# Altium integrated library loz-old-man.IntLib: 86 symbols (part 3 of 3)
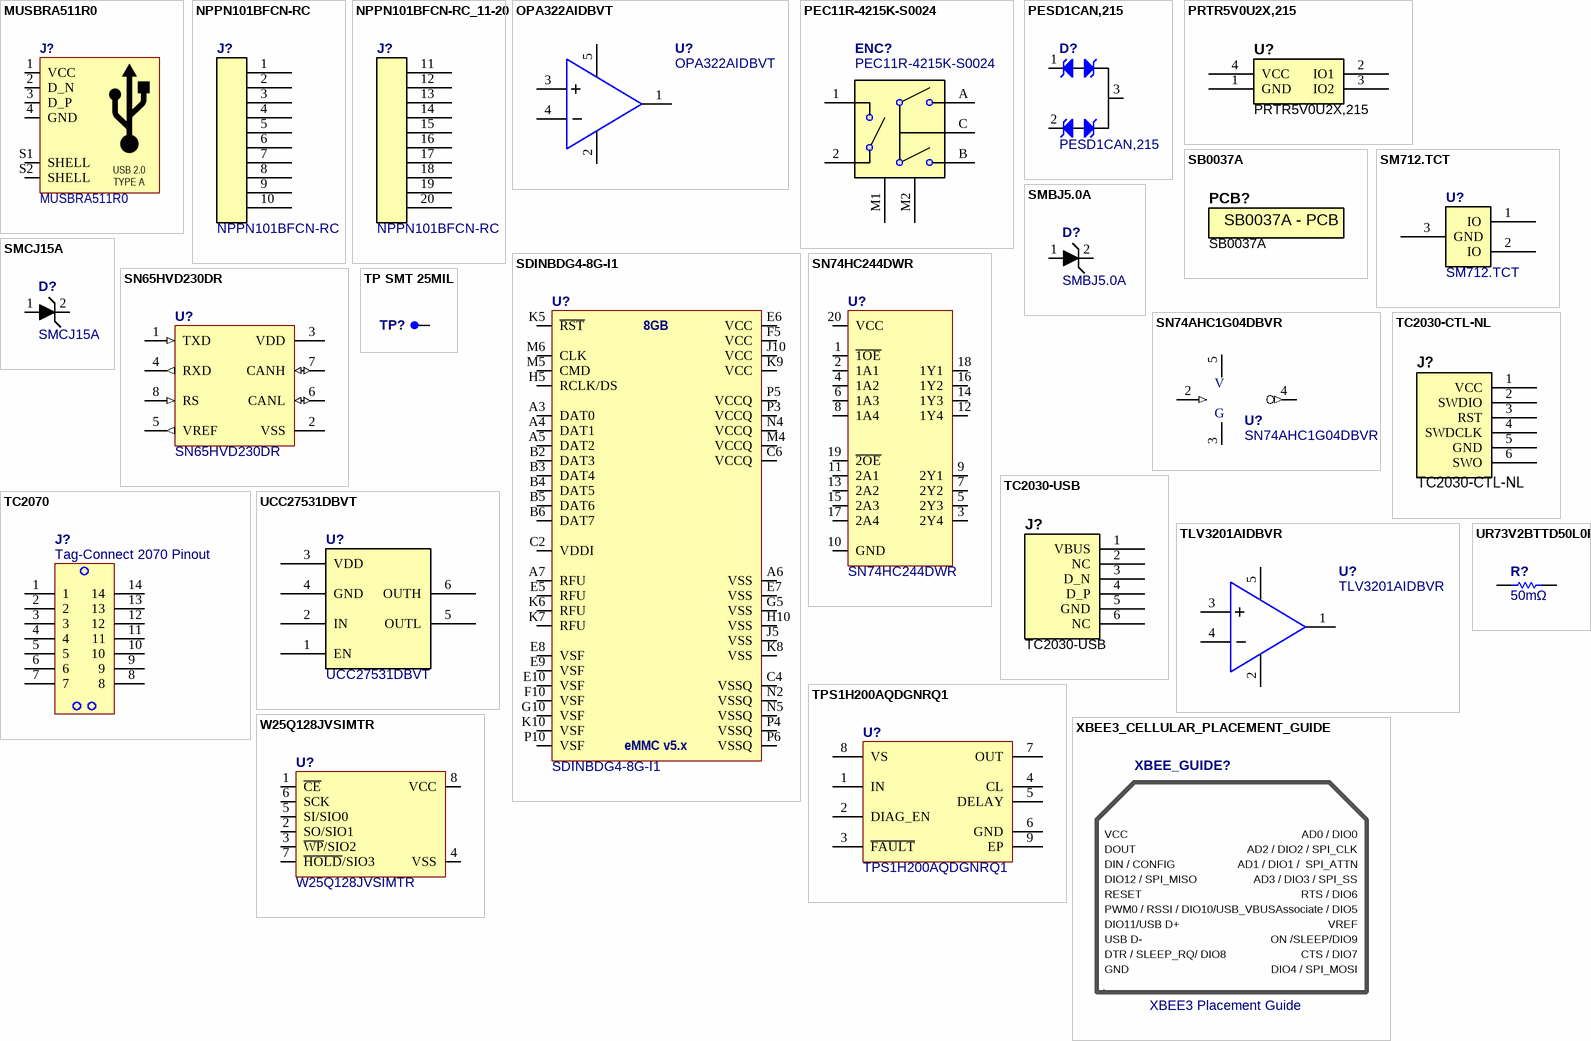
[diagram p7: symbols MUSBRA511R0 to XBEE3_CELLULAR_PLACEMENT_GUIDE]

## PEC11R-4215K-S0024
designator ENC?
Encoders 15mm SHAFT w/SWITCH; Manufacturer: Bourns; Number of Channels: 2; Pulses per Revolution: 24; Built in Switch: Yes; Encoder Type: Mechanical; Output Type: Quadrature,Incremental; Max Supply Voltage (DC): 5V; Hole Diameter: 1.8mm; Value: PEC11R-4215K-S0024; Supplier 1: Digi-Key; Supplier Part Number 1: PEC11R-4215K-S0024-ND; Manufacturer Part Number: PEC11R-4215K-S0024; RoHS: Yes; Category: Encoders; Stock: 2990; Pricing: 1=1.68000, 10=1.56600, 25=1.47920, 50=1.30500, 100=1.07300, 250=1.04400, 500=0.98600, 1000=0.92800, 5000=0.81200 (USD); Mount: Through Hole,Panel,PCB; Min Operating Temperature: -30°C; Max Operating Temperature: 70°C; Package Quantity: 150; Packaging: Bulk; Termination: PC Pin; Orientation: Vertical; Detent: Yes; Length: 21.5mm; Height: 13.4mm; Width: 12.5mm; REACH SVHC: No SVHC; ComponentLink1URL: https://datasheet.ciiva.com/29349/pec11r-29349515.pdf?src-supplier=Digi-Key; ComponentLink1Description: https://datasheet.ciiva.com/29349/pec11r-29349515.pdf?src-supplier=Digi-Key; ComponentLink2URL: https://datasheet.ciiva.com/30066/pec11r-221203-30066108.pdf?src-supplier=Onlinecomponents.com; ComponentLink2Description: https://datasheet.ciiva.com/30066/pec11r-221203-30066108.pdf?src-supplier=Onlinecomponents.com; ComponentLink3URL: https://datasheet.ciiva.com/12176/pec11r-221203-12176991.pdf?src-supplier=Mouser; ComponentLink3Description: https://datasheet.ciiva.com/12176/pec11r-221203-12176991.pdf?src-supplier=Mouser
footprint PEC11R-4215K-S0024 (Rotary mechanical Encoder)
pins: 1, 2, A, B, C, M1, M2

## PESD1CAN,215
designator D?
TVS DIODE 24VWM 70VC SOT23; Manufacturer: NXP Semiconductors; CategorySort: 400; Type: Zener; Bidirectional Channels: 2; Voltage - Reverse Standoff (Typ): 24V (Max); Voltage - Breakdown (Min): 25.4V; Voltage - Clamping (Max) @ Ipp: 70V; Current - Peak Pulse (10/1000µs): 3A (8/20µs); Power - Peak Pulse: 200W; Power Line Protection: No; Capacitance @ Frequency: 11pF @ 1MHz; Value: PESD1CAN,215; Sort Value: *; Category: Diodes; Supplier 1: Digi-Key; Supplier Part Number 1: 568-4032-1-ND; Manufacturer Part Number: PESD1CAN,215; RoHS: RoHS Compliant; Stock 1: 57937; Pricing 1: 1=0.55, 10=0.386, 25=0.3176, 100=0.2537, 250=0.1848, 500=0.15008, 1000=0.11536 (USD); Packaging: Cut Tape (CT); Unidirectional Channels: -; Applications: Automotive; Operating Temperature: -65°C ~ 150°C; Mounting Type: Surface Mount; Package: TO-236-3, SC-59, SOT-23-3; Supplier Device Package: SOT-23-3; ComponentLink1URL: http://www.nxp.com/documents/data_sheet/PESD1CAN.pdf; ComponentLink1Description: http://www.nxp.com/documents/data_sheet/PESD1CAN.pdf; Manufacturer 1: NXP Semiconductors; Manufacturer Part Number 1: PESD1CAN,215
footprint SOT23_MEDIUM (SOT23, 3-Leads, Body 2.90x2.30mm, Pitch 0.95mm, IPC Medium Density)
pins: 1 C1, 2 C2, 3 A

## PRTR5V0U2X,215
designator U?
TVS DIODE 5.5VWM SOT143B; Manufacturer: NXP Semiconductors; Bidirectional Channels: 2; Voltage - Reverse Standoff (Typ): 5.5V (Max); Voltage - Breakdown (Min): 6V; Power Line Protection: Yes; Capacitance @ Frequency: 1pF @ 1MHz; Supplier 1: Digi-Key; Supplier Part Number 1: 568-4140-1-ND; Manufacturer Part Number: PRTR5V0U2X,215; RoHS: RoHS Compliant; Category: Circuit Protection; Stock: 11734; Pricing: 1=0.57, 10=0.477, 25=0.418, 100=0.3578, 250=0.31036, 500=0.26286, 1000=0.20265 (USD); Packaging: Cut Tape (CT); Type: Steering (Rail to Rail); Unidirectional Channels: -; Voltage - Clamping (Max) @ Ipp: -; Current - Peak Pulse (10/1000µs): -; Power - Peak Pulse: -; Applications: General Purpose; Operating Temperature: -40°C ~ 85°C (TA); Mounting Type: Surface Mount; Package / Case: TO-253-4, TO-253AA; Supplier Device Package: SOT-143B; ComponentLink1URL: http://www.nxp.com/documents/data_sheet/PRTR5V0U2X.pdf; ComponentLink1Description: http://www.nxp.com/documents/data_sheet/PRTR5V0U2X.pdf; Value: PRTR5V0U2X,215
footprint SOT143B
pins: 1 GND, 2 IO1, 3 IO2, 4 VCC
1 alternate drawing of the same symbol

## SB0037A
designator PCB?  (mechanical)
SB0037 Temp Controller Raw PCB Rev A; Manufacturer: TZero; Manufacturer Part Number: SB0024B; Value: SB0037A
text: SB0037A - PCB

## SDINBDG4-8G-I1
designator U?
eMMC eMMC seq 300/40 IOPs 7800/8000; Manufacturer: SanDisk; CategorySort: 600; Memory Size: 8 GB; Product Status: New Product; Category: Integrated Circuits; Value: SDINBDG4-8G-I1; Supplier 1: Mouser; Supplier Part Number 1: 467-SDINBDG4-8G-I1; Manufacturer Part Number: SDINBDG4-8G-I1; RoHS: RoHS Compliant; Stock 1: 2925; Pricing 1: 1=9.57, 5=9.03, 10=8.76, 25=8.65, 50=8.61, 100=8.33, 250=8.12, 500=7.95, 1000=7.86 (USD); Series: iNAND 7250; Brand: SanDisk; Moisture Sensitive: Yes; Product Type: eMMC; Standard Pack Qty: 152; Subcategory: Memory & Data Storage; Tradename: iNAND; RoHS - Mouser: Y; Minimum Order Quantity: 1; Reeling: False; ComponentLink1URL: http://www.mouser.com/datasheet/2/669/sandisk_09132017_SanDisk_COM-AUTO-INDUST_DISTI_LIN-1145140.pdf; ComponentLink1Description: http://www.mouser.com/datasheet/2/669/sandisk_09132017_SanDisk_COM-AUTO-INDUST_DISTI_LIN-1145140.pdf
footprint BGA_JDEC_EMMC_11.5x13.1x1.1_153PIN (eMMC JDEC 11.5 x 13.1 x 1.1 MM - 153-PIN)
pins: A3 DAT0, A4 DAT1, A5 DAT2, A6 VSS, A7 RFU, B2 DAT3, B3 DAT4, B4 DAT5, B5 DAT6, B6 DAT7, C2 VDDI, C4 VSSQ, C6 VCCQ, E5 RFU, E6 VCC, E7 VSS, E8 VSF, E9 VSF, E10 VSF, F5 VCC, F10 VSF, G5 VSS, G10 VSF, H5 RCLK/DS, H10 VSS, J5 VSS, J10 VCC, K5 ~{RST}, K6 RFU, K7 RFU, K8 VSS, K9 VCC, K10 VSF, M4 VCCQ, M5 CMD, M6 CLK, N2 VSSQ, N4 VCCQ, N5 VSSQ, P3 VCCQ, P4 VSSQ, P5 VCCQ, P6 VSSQ, P10 VSF
text: 8GB; eMMC v5.x

## SM712.TCT
designator U?
TVS DIODE 12VWM/7VWM SOT23; Manufacturer: Semtech; Direction: Bidirectional; Number of Elements: 2; Reverse Breakdown Voltage: 13.3V; Reverse Standoff Voltage: 12V; Min Breakdown Voltage: 7.5V; Clamping Voltage: 26V; Peak Pulse Power: 400W; Power Line Protection: No; Leakage Current: 1uA; Peak Pulse Current: 17A; Test Current: 1mA; ESD Protection: Yes; Max Reverse Leakage Current: 20uA; Element Configuration: Dual; ComponentLink1URL: https://datasheet.ciiva.com/16393/sm712-16393584.pdf; ComponentLink1Description: https://datasheet.ciiva.com/16393/sm712-16393584.pdf; ComponentLink2URL: https://datasheet.ciiva.com/339/sm712-339089.pdf; ComponentLink2Description: https://datasheet.ciiva.com/339/sm712-339089.pdf; ComponentLink3URL: https://datasheet.ciiva.com/339/sm712-339090.pdf; ComponentLink3Description: https://datasheet.ciiva.com/339/sm712-339090.pdf; ComponentLink4URL: https://datasheet.ciiva.com/339/sm712-339091.pdf; ComponentLink4Description: https://datasheet.ciiva.com/339/sm712-339091.pdf; ComponentLink5URL: https://datasheet.ciiva.com/18065/getdatasheetpartid-110620-18065348.pdf; ComponentLink5Description: https://datasheet.ciiva.com/18065/getdatasheetpartid-110620-18065348.pdf; ComponentLink6URL: https://datasheet.ciiva.com/25958/sm712-25958326.pdf; ComponentLink6Description: https://datasheet.ciiva.com/25958/sm712-25958326.pdf; ComponentLink7URL: https://datasheet.ciiva.com/5748/579001-5748455.pdf; ComponentLink7Description: https://datasheet.ciiva.com/5748/579001-5748455.pdf; ComponentLink8URL: https://datasheet.ciiva.com/8029/579001-8029931.pdf; ComponentLink8Description: https://datasheet.ciiva.com/8029/579001-8029931.pdf; Supplier 1: Digi-Key; Supplier Part Number 1: SM712CT-ND; Manufacturer Part Number: SM712.TCT; Stock 1: 46130; Pricing 1: 1=1.79, 10=1.615, 25=1.442, 100=1.2978, 250=1.1536, 500=1.0094, 1000=0.8364 (USD); Mount: Surface Mount; Case/Package: SOT-23; Number of Pins: 3; Min Operating Temperature: -55°C; Max Operating Temperature: 125°C; Packaging: Tape and Reel; Number of Bidirectional Channels: 2; Power Dissipation: 400W; Polarity: Bidirectional; Working Voltage: 12V; Max Breakdown Voltage: 13.3V; Max Power Dissipation: 400W; Voltage Rating (DC): 12V; Breakdown Voltage: 13.3V; Length: 2.9mm; Height: 0.95mm; Width: 1.3mm; Depth: 1.3mm; Radiation Hardening: No; REACH SVHC: No SVHC; Lead Free: Lead Free; Value: SM712.TCT
footprint SOT-23
pins: 1 IO, 2 IO, 3 GND

## SMBJ5.0A
designator D?
TVS 5.0 VOLT 600 WATT UNI-DIR SM; Manufacturer: Littelfuse Inc; CategorySort: 850; Voltage - Reverse Standoff (Typ): 5V; Voltage - Breakdown: 6.4V; Power (Watts): 600W; Polarization: Unidirectional; Diode Suffix: 1A_2C; Value: SMBJ5.0A; Category: Circuit Protection; Supplier 1: Digi-Key; Supplier Part Number 1: SMBJ5.0ALFCT-ND; Manufacturer Part Number: SMBJ5.0A; Package: DO-214AA- SMB; Packaging: Cut Tape (CT); ComponentLink1URL: http://www.littelfuse.com/~/media/Files/Littelfuse/Technical%20Resources/Documents/Data%20Sheets/Littelfuse_TVS%20Diode_SMBJ.pdf; ComponentLink1Description: Internal Datasheet; ComponentLink2Description: External Datasheet; ComponentLink2URL: http://www.littelfuse.com/~/media/Files/Littelfuse/Technical%20Resources/Documents/Data%20Sheets/Littelfuse_TVS%20Diode_SMBJ.pdf; Stocked: -; SortValue: SMBJ5.0A; Pricing: 1 = 0.46  ;  10 = 0.384  ;  25 = 0.336  ;  100 = 0.2877  ;  250 = 0.24952  ;  500 = 0.21134  ;  1000 = 0.16293 (USD); Sales Status: Active; Mounting Type: Surface Mount; Supplier Device Package: SMB
footprint D_SMB_P
footprint -
pins: 1 A, 2 K

## SMCJ15A
designator D?
DIODE TVS 15V 1500W UNI 5% SMC; Manufacturer: Littelfuse Inc; CategorySort: 850; Voltage - Breakdown: 16.7V; Polarization: Unidirectional; Diode Suffix: 1A_2C; Category: Circuit Protection; Value: SMCJ15A; Manufacturer Part Number: SMCJ15A; ComponentLink1Description: Internal Datasheet; ComponentLink1URL: http://www.littelfuse.com/data/en/Data_Sheets/Littelfuse_TVS_Diode_SMCJ.pdf; ComponentLink2Description: External Datasheet; ComponentLink2URL: http://www.littelfuse.com/data/en/Data_Sheets/Littelfuse_TVS_Diode_SMCJ.pdf; Supplier 1: Digi-Key; Supplier Part Number 1: SMCJ15ALFCT-ND; SortValue: SMCJ15A; Voltage - Reverse Standoff (Typ): 15V; Power (Watts): 1500W; Mounting Type: Surface Mount; Package: DO-214AB- SMC; Supplier Device Package: SMC; Packaging: Cut Tape (CT)
footprint D_SMC_P
footprint -
pins: 1 A, 2 K

## SN65HVD230DR
designator U?
CAN Interface IC STANDBY MODE; Manufacturer: Texas Instruments; CategorySort: 600; Data Rate: 1 Mbps; Operating Supply Voltage: 3.3 V; Supply Voltage - Max: 3.6 V; Supply Voltage - Min: 3 V; Value: SN65HVD230DR; Sort Value: *; Category: Integrated Circuits; Supplier 1: Mouser; Supplier Part Number 1: 595-SN65HVD230DR; Manufacturer Part Number: SN65HVD230DR; RoHS: RoHS Compliant; Stock 1: 6781; Pricing 1: 1=1.95, 10=1.62, 25=1.44, 100=0.972, 250=0.954, 500=0.935, 750=0.917, 2500=0.900 (USD); Package: SOIC-8; Packaging: Reel; Series: SN65HVD230; Type: Transceiver; Mounting Style: SMD/SMT; Maximum Operating Temperature: + 85 C; Minimum Operating Temperature: - 40 C; Product Category: Display Interface; Standard Pack Qty: 2500; RoHS - Mouser: Y; Minimum Order Quantity: 1; Reeling: True; ComponentLink1URL: http://www.ti.com/litv/slos346k; ComponentLink1Description: http://www.ti.com/litv/slos346k
footprint SOIC-8 (SOIC, 8-Leads, Body 5.0x4.0mm (max), Pitch 1.27mm, IPC Medium Density)
pins: 1 TXD (in), 2 VSS (power), 3 VDD (power), 4 RXD (out), 5 VREF (out), 6 CANL (io), 7 CANH (io), 8 RS (in)

## SN74AHC1G04DBVR
designator U?
IC SINGLE INVERTER GATE SOT23-5; Manufacturer: Texas Instruments; CategorySort: 600; Number of Inputs: 1; Current - Output High, Low: 8mA, 8mA; Voltage - Supply: 2 V ~ 5.5 V; Value: SN74AHC1G04DBVR; Sort Value: *; Category: Integrated Circuits; Supplier 1: Digi-Key; Supplier Part Number 1: 296-1089-1-ND; Manufacturer Part Number: SN74AHC1G04DBVR; RoHS: RoHS Compliant; Stock 1: 45111; Pricing 1: 1=0.53, 25=0.31, 100=0.25, 250=0.18, 500=0.145, 1000=0.1125 (USD); Logic Type: Inverter; Number of Circuits: 1; Operating Temperature: -40°C ~ 85°C; Mounting Type: Surface Mount; Package: SC-74A, SOT-753; Supplier Device Package: SOT-23-5; Packaging: Cut Tape (CT); ComponentLink1URL: http://focus.ti.com/lit/ds/symlink/sn74ahc1g04.pdf; ComponentLink1Description: http://focus.ti.com/lit/ds/symlink/sn74ahc1g04.pdf
footprint TSOT-23-5 (SOT23, 5-Leads, Body 3.0x2.9mm (max), Pitch 0.95mm, IPC Medium Density)
pins: 2 A (in), 3 GND, 4 Y (out), 5 VCC
text: V; G

## SN74HC244DWR
designator U?
IC BUFF/DVR TRI-ST DUAL 20SOIC; Manufacturer: Texas Instruments; CategorySort: 600; Logic Type: Buffer/Line Driver, Non-Inverting; Number of Elements: 2; Number of Bits per Element: 4; Current - Output High, Low: 7.8mA, 7.8mA; Voltage - Supply: 2 V ~ 6 V; Value: SN74HC244DWR; Sort Value: *; Category: Integrated Circuits; Supplier 1: Digi-Key; Manufacturer Part Number: SN74HC244DWR; RoHS: RoHS Compliant; Stock 1: 40951; Pricing 1: 1=0.58, 25=0.4044, 100=0.3465, 250=0.29924, 500=0.25726, 1000=0.1995 (USD); Operating Temperature: -40°C ~ 85°C; Mounting Type: Surface Mount; Package: 20-SOIC (0.300", 7.50mm Width); Packaging: Cut Tape (CT); Supplier Device Package: 20-SOIC; ComponentLink1URL: http://focus.ti.com/lit/ds/symlink/sn74hc244.pdf; ComponentLink1Description: http://focus.ti.com/lit/ds/symlink/sn74hc244.pdf; Supplier Part Number 1: 296-1196-1-ND
footprint SOIC-20-300_MEDIUM (SOIC-20 0.300 inch wide)
pins: 1 ~{1OE}, 2 1A1, 3 2Y4, 4 1A2, 5 2Y3, 6 1A3, 7 2Y2, 8 1A4, 9 2Y1, 10 GND, 11 2A1, 12 1Y4, 13 2A2, 14 1Y3, 15 2A3, 16 1Y2, 17 2A4, 18 1Y1, 19 ~{2OE}, 20 VCC

## TC2030‐CTL‐NL
designator J?  (no BOM)
Tag Connect Pads - No latching Clips - ARM; Value: TC2030‐CTL‐NL
footprint TC2030 NO LATCH (TC2030  NO LATCH)
footprint TC2030 DOUBLE SIDED NO LATCH (TC2030 Double Sided No Latch)
footprint TC2030 DOUBLE SIDED (TC2030 Double Sided)
footprint TC2030 (TC2030-MCP)
pins: 1 VCC, 2 SWDIO, 3 RST, 4 SWDCLK, 5 GND, 6 SWO

## TC2030‐USB
designator J?  (no BOM)
Tag Connect Pads - No latching Clips - USB; Value: TC2030‐USB
footprint TC2030 NO LATCH (TC2030  NO LATCH)
footprint TC2030 DOUBLE SIDED NO LATCH (TC2030 Double Sided No Latch)
footprint TC2030 DOUBLE SIDED (TC2030 Double Sided)
footprint TC2030 (TC2030-MCP)
pins: 1 VBUS, 2 NC, 3 D_N, 4 D_P, 5 GND, 6 NC

## TC2070
designator J?, comment Tag-Connect 2070 Pinout  (no BOM)
footprint TC2070 (TC2070 14-PIN TAG-CONNECT WITH LEGS)
footprint TC2070-NL (TC2070 14-PIN TAG-CONNECT WITH LEGS)
pins: 1, 2, 3, 4, 5, 6, 7, 8, 9, 10, 11, 12, 13, 14

## TLV3201AIDBVR
designator U?
Single high speed, low power comparator 5-SOT-23 -40 to 125; Manufacturer: Texas Instruments; Max Supply Voltage: 5.5V; Min Supply Voltage: 2.7V; Number of Channels: 1; Nominal Supply Current: 50uA; Common Mode Rejection Ratio: 70dB; Propagation Delay: 50ns; Max Supply Current: 40uA; Input Bias Current: 5nA; Input Offset Voltage (Vos): 5mV; Response Time: 0.047us; Hysteresis: 1.2mV; Power Supply Rejection Ratio (PSRR): 85dB; Output Current: 21mA; Value: TLV3201AIDBVR; Supplier 1: Digi-Key; Supplier Part Number 1: 296-36750-1-ND; Manufacturer Part Number: TLV3201AIDBVR; Category: Comparators; Stock: 27179; Pricing: 1=1.36000, 10=1.21500, 25=1.15360, 100=0.88580, 250=0.78280, 500=0.74160, 1000=0.57680 (USD); Mount: Surface Mount; Case/Package: SOT-23-5; Number of Pins: 5; Contact Plating: Gold; Min Operating Temperature: -40°C; Max Operating Temperature: 125°C; Packaging: Tape and Reel; Package Quantity: 3000; Number of Elements: 1; Max Input Current: 5nA; Quiescent Current: 40uA; Type: General Purpose; Radiation Hardening: No; Lead Free: Lead Free; REACH SVHC: No SVHC; ComponentLink1URL: https://datasheet.ciiva.com/12286/sbos561a-203450-12286704.pdf?src-supplier=Mouser; ComponentLink1Description: https://datasheet.ciiva.com/12286/sbos561a-203450-12286704.pdf?src-supplier=Mouser; ComponentLink2URL: https://datasheet.ciiva.com/29634/tlv3201-29634998.pdf?src-supplier=Digi-Key; ComponentLink2Description: https://datasheet.ciiva.com/29634/tlv3201-29634998.pdf?src-supplier=Digi-Key; ComponentLink3URL: https://datasheet.ciiva.com/29634/tlv3201-29634999.pdf?src-supplier=Digi-Key; ComponentLink3Description: https://datasheet.ciiva.com/29634/tlv3201-29634999.pdf?src-supplier=Digi-Key; ComponentLink4URL: https://datasheet.ciiva.com/29635/tlv3201-29635000.pdf?src-supplier=Digi-Key; ComponentLink4Description: https://datasheet.ciiva.com/29635/tlv3201-29635000.pdf?src-supplier=Digi-Key; ComponentLink5URL: https://datasheet.ciiva.com/2966/tlv3202-2966810.pdf?src-supplier=Avnet; ComponentLink5Description: https://datasheet.ciiva.com/2966/tlv3202-2966810.pdf?src-supplier=Avnet; ComponentLink6URL: https://octopart.com/click/track?ai=8629&ct=datasheets&sig=0da13b1&at=physicalpart&sid=370&ppid=22616100&hlid=24934711&src-supplier=TI+store; ComponentLink6Description: https://octopart.com/click/track?ai=8629&ct=datasheets&sig=0da13b1&at=physicalpart&sid=370&ppid=22616100&hlid=24934711&src-supplier=TI+store; ComponentLink7URL: http://datasheet.octopart.com/TLV3201AIDBVR-Texas-Instruments-datasheet-37140356.pdf?src-supplier=Newark; ComponentLink7Description: http://datasheet.octopart.com/TLV3201AIDBVR-Texas-Instruments-datasheet-37140356.pdf?src-supplier=Newark; ComponentLink8URL: http://datasheet.octopart.com/TLV3201AIDBVR-Texas-Instruments-datasheet-10947357.pdf?src-supplier=TI+store; ComponentLink8Description: http://datasheet.octopart.com/TLV3201AIDBVR-Texas-Instruments-datasheet-10947357.pdf?src-supplier=TI+store; ComponentLink9URL: http://datasheet.octopart.com/TLV3201AIDBVR-Texas-Instruments-datasheet-11515870.pdf?src-supplier=TI+store; ComponentLink9Description: http://datasheet.octopart.com/TLV3201AIDBVR-Texas-Instruments-datasheet-11515870.pdf?src-supplier=TI+store; ComponentLink10URL: http://sigma.octopart.com/49249325/technical_drawing/Texas-Instruments-TLV3201AIDBVR.pdf?src-supplier=TI+store; ComponentLink10Description: http://sigma.octopart.com/49249325/technical_drawing/Texas-Instruments-TLV3201AIDBVR.pdf?src-supplier=TI+store; ComponentLink11URL: http://sigma.octopart.com/102331370/technical_drawing/Texas-Instruments-TLV3201AIDBVR.pdf?src-supplier=TI+store; ComponentLink11Description: http://sigma.octopart.com/102331370/technical_drawing/Texas-Instruments-TLV3201AIDBVR.pdf?src-supplier=TI+store; ComponentLink12URL: http://datasheet.octopart.com/TLV3201AIDBVR-Texas-Instruments-datasheet-103689170.pdf?src-supplier=Newark; ComponentLink12Description: http://datasheet.octopart.com/TLV3201AIDBVR-Texas-Instruments-datasheet-103689170.pdf?src-supplier=Newark; ComponentLink13URL: http://datasheet.octopart.com/TLV3201AIDBVR-Texas-Instruments-datasheet-81455961.pdf?src-supplier=TME; ComponentLink13Description: http://datasheet.octopart.com/TLV3201AIDBVR-Texas-Instruments-datasheet-81455961.pdf?src-supplier=TME
footprint SOT23-5 (SOT23, 5-Leads, Body 3.1x2.6mm (max), Pitch 0.95mm, IPC High Density)
pins: 1 OUT, 2 GND, 3 +, 4 -, 5 VCC

## TP SMT 25MIL
designator TP?  (net tie, no BOM)
Sort Value: *; Category: *; CategorySort: *
footprint TP_SMT_25_MIL_ROUND
pins: 1

## TPS1H200AQDGNRQ1
designator U?
SINGLE CHANNEL HIGH SIDE POWER S; Manufacturer: Texas Instruments; Number of Channels: 1; CategorySort: 600; Supplier 1: Digi-Key; Manufacturer Part Number: TPS1H200AQDGNRQ1; Stock 1: 8489; Pricing 1: 1 = 1.59000, 10 = 1.43000, 100 = 1.14960, 500 = 0.94452, 1000 = 0.78259 (USD); RoHS: No; Min Operating Temperature: -40°C; Max Operating Temperature: 125°C; ComponentLink1URL: http://www.ti.com/lit/ds/symlink/tps1h200a-q1.pdf?src-supplier=Digi-Key; ComponentLink1Description: http://www.ti.com/lit/ds/symlink/tps1h200a-q1.pdf?src-supplier=Digi-Key; Supplier Part Number 1: 296-50416-1-ND; Category: Integrated Circuits; Value: TPS1H200AQDGNRQ1
footprint TI_DGN_MD (HVSSOP, 8-Leads, Body 3.00x3.00mm, Pitch 0.65mm, Thermal Pad 1.89x1.57mm, IPC Medium Density)
footprint TI_DGN_HD (HVSSOP, 8-Leads, Body 3.00x3.00mm, Pitch 0.65mm, Thermal Pad 1.89x1.57mm, IPC High Density)
pins: 1 IN, 2 DIAG_EN, 3 ~{FAULT}, 4 CL, 5 DELAY, 6 GND, 7 OUT, 8 VS, 9 EP

## UCC27531DBVT
designator U?
IC GATE DRVR IGBT/MOSFET SOT23-6; Manufacturer: Texas Instruments; Driven Configuration: High-Side or Low-Side; Channel Type: Single; Gate Type: IGBT, N-Channel MOSFET; Voltage - Supply: 10 V ~ 32 V; Logic Voltage - VIL, VIH: 1.2V, 2.2V; Current - Peak Output (Source, Sink): 2.5A, 5A; Input Type: Non-Inverting; Rise / Fall Time (Typ): 15ns, 7ns; Value: UCC27531DBVT; Supplier 1: Digi-Key; Supplier Part Number 1: 296-35613-1-ND; Manufacturer Part Number: UCC27531DBVT; RoHS: RoHS Compliant; Category: Integrated Circuits (ICs); Stock 1: 1544; Pricing 1: 1=2.36, 10=2.121, 100=1.7047 (USD); Packaging: Cut Tape (CT); Part Status: Active; Operating Temperature: -40°C ~ 140°C (TJ); Mounting Type: Surface Mount; Package / Case: SOT-23-6; Supplier Device Package: SOT-23-6; ComponentLink1URL: http://www.ti.com/lit/ds/symlink/ucc27531.pdf; ComponentLink1Description: http://www.ti.com/lit/ds/symlink/ucc27531.pdf
footprint SOT95P245X145-6L (SOT23, 5-Leads, Body 3.1x2.6mm (max), Pitch 0.95mm, IPC High Density)
pins: 1 EN, 2 IN, 3 VDD, 4 GND, 5 OUTL, 6 OUTH

## UR73V2BTTD50L0F
designator R?, comment 50mΩ
RES 0.05 OHM 1% 1/2W 1206; Manufacturer: KOA Speer Electronics, Inc.; Manufacturer Part Number: UR73V2BTTD50L0F; Package Power: PACKAGE (POWER); Temperature Coefficient: ±75ppm/°C; Power (Watts): 0.5W, 1/2W; Substitution Notes: 50mΩ , 1206 , ±1% , ±75ppm/°C ,  0.5W, 1/2W , AEC-Q200; Value: 50mΩ; ComponentLink1Description: Datasheet (Internal); ComponentLink1URL: http://www.koaspeer.com/catimages/Products/UR73V/UR73V.pdf; ComponentLink2Description: Datasheet (External); ComponentLink2URL: http://www.koaspeer.com/catimages/Products/UR73V/UR73V.pdf; Supplier 1: Digikey; Supplier Part Number 1: 2019-UR73V2BTTD50L0FTR-ND; Category: Resistors; Tolerance: ±1%; Operating Temperature: -55°C ~ 155°C; Ratings: AEC-Q200; Package: 1206; Thickness (Max): 0.60MM; Manufacturer 1: KOA Speer Electronics, Inc.; Manufacturer Part Number 1: UR73V2BTTD50L0F
footprint R1206_0.60MM_MD
footprint R1206_0.60MM_HD
footprint R1206_0.60MM_LD
pins: 1, 2

## W25Q128JVSIMTR
designator U?
IC FLASH 128M SPI 133MHZ 8SOIC; Manufacturer: Winbond; CategorySort: 600; Category: Integrated Circuits; Value: W25Q128JVSIMTR; Supplier 1: Digi-Key; Supplier Part Number 1: W25Q128JVSIMCT-ND; Manufacturer Part Number: W25Q128JVSIMTR; Stock 1: 44076; Pricing 1: 1=1.62000, 10=1.47500, 25=1.43560, 50=1.42800, 100=1.27650, 250=1.27272, 500=1.25378, 1000=1.20000 (USD); RoHS: No; ComponentLink1URL: http://www.winbond.com/resource-files/w25q128jv_dtr%20revc%2003272018%20plus.pdf?src-supplier=Digi-Key; ComponentLink1Description: http://www.winbond.com/resource-files/w25q128jv_dtr%20revc%2003272018%20plus.pdf?src-supplier=Digi-Key
footprint SOIC-8W (SOIC8 208mil Wide Body)
pins: 1 ~{CE}, 2 SO/SIO1, 3 ~{WP}/SIO2, 4 VSS, 5 SI/SIO0, 6 SCK, 7 ~{HOLD}/SIO3, 8 VCC

## XBEE3_CELLULAR_PLACEMENT_GUIDE
designator XBEE_GUIDE?, comment XBEE3 Placement Guide  (no BOM)
Value: XBEE3 Placement Guide
footprint XBEE3_CELLULAR_PLACEMENT_GUIDE (Placement guide for the XBEE3 cell module)
text: AD0 / DIO0; VCC; AD2 / DIO2 / SPI_CLK; DOUT; AD1 / DIO1 /  SPI_ATTN; DIN / CONFIG; AD3 / DIO3 / SPI_SS; DIO12 / SPI_MISO; RTS / DIO6; RESET; Associate / DIO5; PWM0 / RSSI / DIO10/USB_VBUS; VREF; DIO11/USB D+; ON /SLEEP/DIO9; USB D-; CTS / DIO7; DTR / SLEEP_RQ/ DIO8; DIO4 / SPI_MOSI; GND

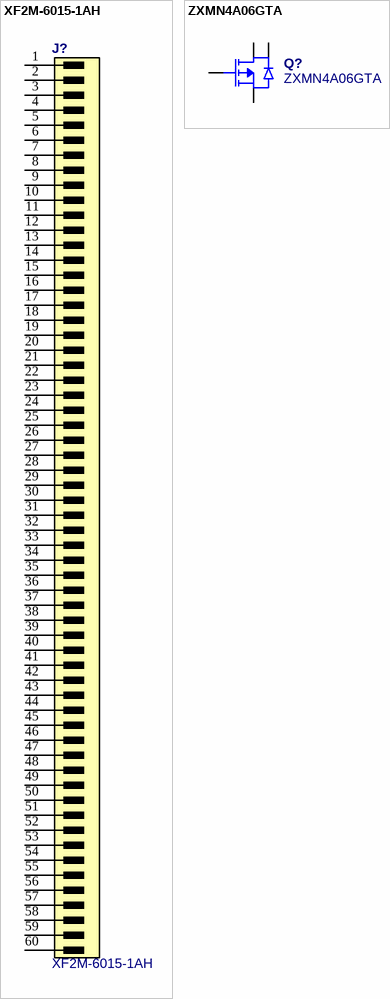
[diagram p5: symbols XF2M-6015-1AH to ZXMN4A06GTA]

## XF2M-6015-1AH
designator J?
CONN FPC 60POS 0.50MM R/A; Manufacturer: Omron; Actuator Material: Polymer,Liquid Crystal Polymer; Voltage Rating: 50V; Current Rating: 500mA; Number of Positions: 60; Gender: Receptacle; Pitch: 0.5mm; Contact Resistance: 50mR; Value: XF2M-6015-1AH; Supplier 1: Newark; Manufacturer Part Number: XF2M-6015-1AH; Stock 1: 1054; Pricing 1: 1=0.63900, 10=0.63900, 25=0.63900, 50=0.63900, 100=0.63900, 250=0.63900, 500=0.63900 (USD); RoHS: Yes; Mount: Surface Mount; Contact Material: Copper Alloy; Contact Plating: Gold; Housing Material: Polymer; Min Operating Temperature: -30°C; Max Operating Temperature: 85°C; Packaging: Tape and Reel; Number of Rows: 1; Termination: Solder; Orientation: Right Angle; Package Quantity: 1; Flammability Rating: UL94 V-0; REACH SVHC: Unknown; ComponentLink1URL: https://datasheet.ciiva.com/26945/getdatasheetpartid-792262-26945584.pdf?src-supplier=Verical; ComponentLink1Description: https://datasheet.ciiva.com/26945/getdatasheetpartid-792262-26945584.pdf?src-supplier=Verical; ComponentLink2URL: https://datasheet.ciiva.com/672/en-xf2m-672256.pdf?src-supplier=Digi-Key; ComponentLink2Description: https://datasheet.ciiva.com/672/en-xf2m-672256.pdf?src-supplier=Digi-Key; ComponentLink3URL: https://datasheet.ciiva.com/10367/xf2m-10367321.pdf?src-supplier=Avnet; ComponentLink3Description: https://datasheet.ciiva.com/10367/xf2m-10367321.pdf?src-supplier=Avnet; ComponentLink4URL: https://datasheet.ciiva.com/16122/en-xf2m-16122554.pdf?src-supplier=Onlinecomponents.com; ComponentLink4Description: https://datasheet.ciiva.com/16122/en-xf2m-16122554.pdf?src-supplier=Onlinecomponents.com; Supplier Part Number 1: 88M4894; Housing Color: Natural; Max Current Rating: 500mA; Max Voltage Rating (DC): 50V; Max Voltage Rating (AC): 50V; Number of Contacts: 60; Length: 34.1mm; Depth: 6.2mm; Lead Free: Lead Free; ComponentLink5URL: https://datasheet.ciiva.com/672/en-xf2m-672255.pdf?src-supplier=Digi-Key; ComponentLink5Description: https://datasheet.ciiva.com/672/en-xf2m-672255.pdf?src-supplier=Digi-Key; ComponentLink6URL: https://datasheet.ciiva.com/7989/1465437-7989453.pdf?src-supplier=Element14; ComponentLink6Description: https://datasheet.ciiva.com/7989/1465437-7989453.pdf?src-supplier=Element14; ComponentLink7URL: https://datasheet.ciiva.com/672/en-xf2m-672254.pdf?src-supplier=Digi-Key; ComponentLink7Description: https://datasheet.ciiva.com/672/en-xf2m-672254.pdf?src-supplier=Digi-Key
footprint XF2M-6015-1AH (FFC Connector 0.5mm pitch)
footprint XF2M-6015-1AH - Reverse (FFC Connector 0.5mm pitch)
pins: 1 (power), 2 (power), 3 (power), 4 (power), 5, 6, 7, 8, 9, 10, 11, 12, 13, 14, 15, 16, 17, 18, 19, 20, 21, 22, 23, 24, 25, 26, 27, 28, 29, 30, 31, 32, 33, 34, 35, 36, 37, 38 XR, 39, 40, 41, 42, 43, 44, 45, 46, 47, 48, 49 19, 50, 51, 52, 53, 54, 55, 56, 57, 58, 59, 60

## ZXMN4A06GTA
designator Q?
Trans MOSFET N-CH 40V 7A 4-Pin(3+Tab) SOT-223 T/R; Manufacturer: Diodes Zetex; Rise Time: 4.45ns; Gate to Source Voltage (Vgs): 20V; Fall Time: 7.35ns; Turn-Off Delay Time: 28.61ns; Turn-On Delay Time: 2.55ns; Max Power Dissipation: 3.9W; Rds On Max: 50mR; Input Capacitance: 770pF; Number of Elements: 1; Drain to Source Resistance: 75mR; Threshold Voltage: 1V; Element Configuration: Single; Current Rating: 6.7A; Value: ZXMN4A06GTA; Supplier 1: Digi-Key; Manufacturer Part Number: ZXMN4A06GTA; Stock 1: 50125; Pricing 1: 1=0.84000, 10=0.73900, 100=0.50380, 500=0.42096 (USD); RoHS: Yes; Mount: Surface Mount; Case/Package: SOT-223; Number of Pins: 4; Weight: 0.000282oz; Min Operating Temperature: -55°C; Max Operating Temperature: 150°C; Continuous Drain Current (ID): 7A; Packaging: Tape and Reel; Package Quantity: 1000; Drain to Source Voltage (Vdss): 40V; Drain to Source Breakdown Voltage: 40V; Power Dissipation: 3.9W; Voltage Rating (DC): 40V; Number of Channels: 1; On-State Resistance: 75mR; Length: 6.7mm; Height: 1.65mm; Width: 3.7mm; Radiation Hardening: No; REACH SVHC: No SVHC; Lead Free: Lead Free; ComponentLink1URL: https://datasheet.ciiva.com/16509/zxmn4a06g-16509072.pdf?src-supplier=Future+Electronics; ComponentLink1Description: https://datasheet.ciiva.com/16509/zxmn4a06g-16509072.pdf?src-supplier=Future+Electronics; ComponentLink2URL: https://datasheet.ciiva.com/11176/zxmn4a06g-11176340.pdf?src-supplier=Avnet; ComponentLink2Description: https://datasheet.ciiva.com/11176/zxmn4a06g-11176340.pdf?src-supplier=Avnet; ComponentLink3URL: https://datasheet.ciiva.com/26816/getdatasheetpartid-86229-26816612.pdf?src-supplier=Verical; ComponentLink3Description: https://datasheet.ciiva.com/26816/getdatasheetpartid-86229-26816612.pdf?src-supplier=Verical; ComponentLink4URL: https://datasheet.ciiva.com/5775/44098-5775224.pdf?src-supplier=Farnell; ComponentLink4Description: https://datasheet.ciiva.com/5775/44098-5775224.pdf?src-supplier=Farnell; ComponentLink5URL: https://datasheet.ciiva.com/11174/zxmn4a06g-11174983.pdf?src-supplier=Avnet; ComponentLink5Description: https://datasheet.ciiva.com/11174/zxmn4a06g-11174983.pdf?src-supplier=Avnet; Supplier Part Number 1: ZXMN4A06GCT-ND
footprint SOT223 (SOT223, 4-Leads, Body 6.7x7.3mm (max), Pitch 2.30mm, IPC High Density)
pins: 1 G, 2 D, 3 S, 4 D